# Altium footprint library IT_FRONT_PANEL.PcbLib: 1 footprints
Each footprint in its own frame and in the unit in brackets; x right, y up, seen from the top. Pads: shape width x height; smd on the part's side, far side on the other; paste and mask are expansions set on the pad; w line width, h text height; cw(c..) or ccw(c..) is an arc to the next point about the centre after c.
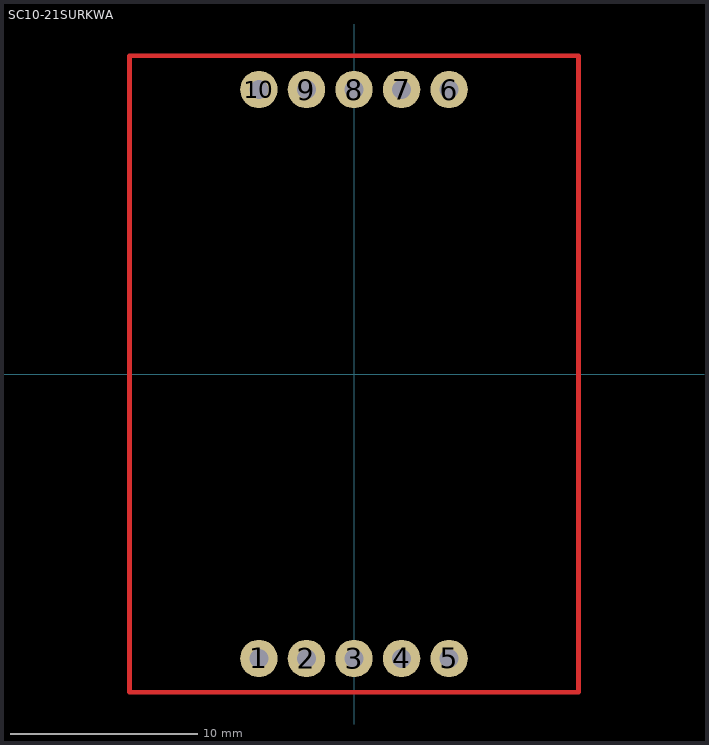
[diagram p0: the footprint, top view; thin cyan lines are the x and y axes]

## SC10-21SURKWA [mm]
pads (10):
  round 2 hole 1 square: 1(-5.08,-15.2)
  round 2 hole 1: 2(-2.54,-15.2) 3(0,-15.2) 4(2.54,-15.2) 5(5.08,-15.2) 6(5.08,15.2) 7(2.54,15.2) 8(0,15.2) 9(-2.54,15.2) 10(-5.08,15.2)
Top Layer:
  lines w0.254: -12,-17 12,-17 12,17 -12,17 -12,-17
3D body "SA10-21.STEP": height 10.5, standoff -4, extent -12,-17 12,17